# Altium footprint library FanARGB_Parts.PcbLib: 21 footprints (part 1 of 2)
Each footprint in its own frame and in the unit in brackets; x right, y up, seen from the top. Pads: shape width x height; smd on the part's side, far side on the other; paste and mask are expansions set on the pad; w line width, h text height; cw(c..) or ccw(c..) is an arc to the next point about the centre after c.
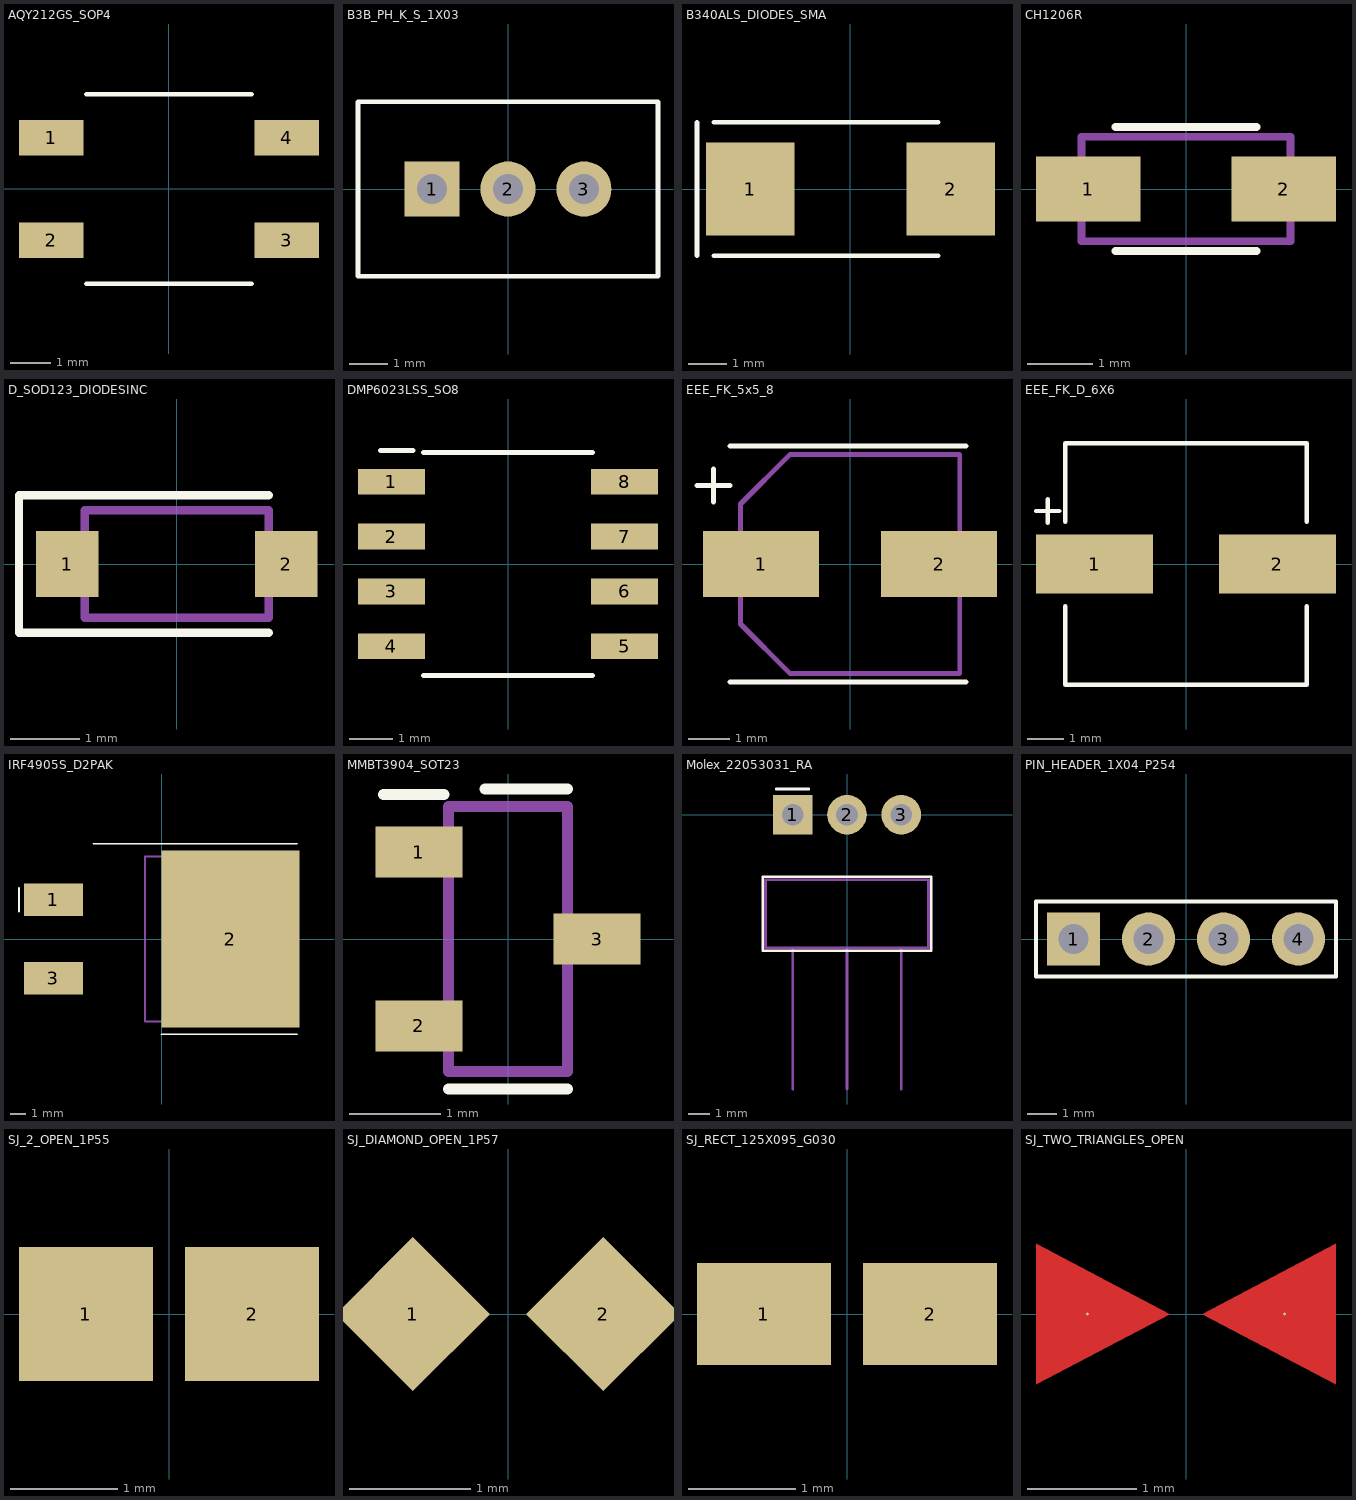
[diagram p0: the footprints below, top view; thin cyan lines are the x and y axes]

## AQY212GS_SOP4 [mm] "Panasonic AQY212GS, four leads"
pads (4):
  rect 1.6x0.88 smd: 1(-2.92,1.27) 2(-2.92,-1.27) 3(2.92,-1.27) 4(2.92,1.27)
Top Overlay:
  lines w0.12: -2.05,-2.35 2.05,-2.35 ; -2.05,2.35 2.05,2.35
3D body "AQY212GS.step": height 2.19, standoff 0.02, extent -3.05,-2.15 3.05,2.15

## B3B_PH_K_S_1X03 [mm] "JST PH 2 mm vertical, B3B-PH-K-S"
pads (3):
  rect 1.45x1.45 hole 0.8: 1(-2,0)
  round 1.45 hole 0.8: 2(0,0) 3(2,0)
Top Overlay:
  lines w0.12: -3.95,-2.3 3.95,-2.3 3.95,2.3 -3.95,2.3 -3.95,-2.3
3D body "JST_PH_3.step": height 6, standoff -2.95, extent -3.95,-2.3 3.95,2.2

## B340ALS_DIODES_SMA [mm] "Diodes Inc B340A-LS 40V 3A SMA Schottky, K1 A2"
pads (2):
  rect 2.3x2.4 smd: 1(-2.6,0) 2(2.6,0)
Top Overlay:
  lines w0.12: -3.98,-1.73 -3.98,1.73 ; -3.55,-1.73 2.28,-1.73 ; -3.55,1.73 2.28,1.73
3D body "D_SMA.step": height 2.22, standoff 0, extent -2.5,-1.35 2.5,1.35

## CH1206R [mm] "1206 resistor, existing NotOnlyFans CH1206R land"
height 0.6
pads (2):
  rect 1.6x1 smd: 1(-1.5,0) 2(1.5,0)
Top Overlay:
  lines w0.12: -1.08,-0.95 1.08,-0.95 ; -1.08,0.95 1.08,0.95
Mechanical 1:
  lines w0.12: -1.6,-0.8 1.6,-0.8 1.6,0.8 -1.6,0.8 -1.6,-0.8
3D body "R1206.step": height 0.55, standoff 0, extent -1.6,-0.8 1.6,0.8

## D_SOD123_DIODESINC [mm] "Diodes Incorporated SOD-123; cathode pad 1"
height 1.35
pads (2):
  rect 0.9x0.95 smd: 1(-1.575,0) 2(1.575,0)
Top Overlay:
  lines w0.12: 1.325,-0.99 -2.27,-0.99 -2.27,0.99 1.325,0.99
Mechanical 1:
  lines w0.12: -1.325,-0.775 -1.325,0.775 1.325,0.775 1.325,-0.775 -1.325,-0.775
3D body "SOD123.step": height 1.25, standoff 0, extent -1.9,-0.8 1.9,0.8

## DMP6023LSS_SO8 [mm] "DMP6023LSS-13 P-MOS -60V, S1-3 G4 D5-8, SO-8"
pads (8):
  rect 1.55x0.6 smd: 1(-2.7,1.905) 2(-2.7,0.635) 3(-2.7,-0.635) 4(-2.7,-1.905) 5(2.7,-1.905) 6(2.7,-0.635) 7(2.7,0.635) 8(2.7,1.905)
Top Overlay:
  lines w0.12: -2.95,2.63 -2.2,2.63 ; -1.95,-2.58 1.95,-2.58 ; -1.95,2.58 1.95,2.58
3D body "SO8.step": height 1.75, standoff 0, extent -3,-2.45 3,2.45

## EEE_FK_5x5_8 [mm] "Panasonic EEE-FK size C, dia. 5 x 5.8 mm; positive pad 1"
height 5.8
pads (2):
  rect 2.8x1.6 smd: 1(-2.15,0) 2(2.15,0)
Top Overlay:
  lines w0.12: -3.7,1.9 -2.9,1.9 ; -3.3,1.5 -3.3,2.3 ; -2.9,-2.85 2.8,-2.85 ; -2.9,2.85 2.8,2.85
Mechanical 1:
  lines w0.12: -2.65,-1.45 -2.65,1.45 -1.45,2.65 2.65,2.65 2.65,-2.65 -1.45,-2.65 -2.65,-1.45
3D body "FK5.step": height 5.8, standoff 0, extent -3.25,-2.65 3.25,2.65

## EEE_FK_D_6X6 [mm] "Panasonic EEE-FK1V470P case D / 6.3 mm, 47uF / 35V"
pads (2):
  rect 3.2x1.6 smd: 1(-2.5,0) 2(2.5,0)
Top Overlay:
  lines w0.12: -4.1,1.45 -3.46,1.45 ; -3.78,1.13 -3.78,1.77 ; -3.3,-1.15 -3.3,-3.3 3.3,-3.3 3.3,-1.15 ; -3.3,1.15 -3.3,3.3 3.3,3.3 3.3,1.15
3D body "full_cap.step": height 5.8, standoff 0, extent -4.05,-3.3 4.05,3.3

## IRF4905S_D2PAK [mm] "Infineon IRF4905S D2PAK; gate 1, drain tab 2, source 3"
height 4.83
pads (3):
  rect 3.81x2.08 smd: 1(-6.985,2.54) 3(-6.985,-2.54)
  rect 8.89x11.43 smd paste-0.65: 2(4.445,0)
Top Overlay:
  lines w0.12: -9.21,1.78 -9.21,3.3 ; -4.4,6.15 8.75,6.15 ; 0,-6.15 8.75,-6.15
Mechanical 1:
  lines w0.12: -1.08,-5.335 -1.08,5.335 8.57,5.335 8.57,-5.335 -1.08,-5.335
3D body "D2PAK.step": height 4.42, standoff 0, extent -7.5,-5 7.5,5

## MMBT3904_SOT23 [mm] "onsemi SOT-23 case 318; base 1, emitter 2, collector 3"
height 1.11
pads (3):
  rect 0.95x0.56 smd: 1(-0.975,0.95) 2(-0.975,-0.95) 3(0.975,0)
Top Overlay:
  lines w0.12: -1.36,1.58 -0.7,1.58 ; -0.65,-1.64 0.65,-1.64 ; -0.25,1.64 0.65,1.64
Mechanical 1:
  lines w0.12: -0.65,-1.45 -0.65,1.45 0.65,1.45 0.65,-1.45 -0.65,-1.45
3D body "SOT23.step": height 1.2, standoff 0, extent -1.25,-1.5 1.25,1.5

## Molex_22053031_RA [mm] "Molex 22-05-3031 KK254 Series 7478, 3 circuit right-angle THT"
height 6.35
pads (3):
  rect 1.85x1.85 hole 1.016: 1(-2.54,0)
  round 1.85 hole 1.016: 2(0,0) 3(2.54,0)
Top Overlay:
  lines w0.12: -3.3,1.2 -1.78,1.2 ; -3.95,-6.37 -3.95,-2.91 3.95,-2.91 3.95,-6.37 -3.95,-6.37
Mechanical 1:
  lines w0.12: -2.54,-12.83 -2.54,-6.23 ; 0,-12.83 0,-6.23 ; 2.54,-12.83 2.54,-6.23 ; -3.81,-6.23 -3.81,-3.05 3.81,-3.05 3.81,-6.23 -3.81,-6.23
3D body "Molex_22053031.step": height 6.35, standoff -3.58, extent -3.81,-12.83 3.81,0.32

## PIN_HEADER_1X04_P254 [mm] "Samtec TSW-104-07-T-S, 1x4 vertical header"
pads (4):
  rect 1.8x1.8 hole 1.016: 1(-3.81,0)
  round 1.8 hole 1.016: 2(-1.27,0) 3(1.27,0) 4(3.81,0)
Top Overlay:
  lines w0.12: -5.08,-1.27 5.08,-1.27 5.08,1.27 -5.08,1.27 -5.08,-1.27
3D body "PinHeader_1x04.step": height 8.26, standoff -3, extent -5.08,-1.27 5.08,1.27

## SJ_2_OPEN_1P55 [mm] "Normally open solder bridge, 0.30 mm copper gap, no paste"
pads (2):
  rect 1.25x1.25 smd: 1(-0.775,0) 2(0.775,0)

## SJ_DIAMOND_OPEN_1P57 [mm] "Normally open solder bridge, 0.297 mm tip gap, no paste on PCB"
pads (2):
  rect 0.9x0.9 smd rot 45 paste-1.25 mask+0.055: 1(-0.785,0) 2(0.785,0)

## SJ_RECT_125X095_G030 [mm] "Normally open solder bridge, 0.30 mm copper gap, no paste"
pads (2):
  rect 1.25x0.95 smd paste-1.25 mask+0.055: 1(-0.775,0) 2(0.775,0)

## SJ_TWO_TRIANGLES_OPEN [mil] "Two opposed triangular copper pads. Normally open."
pads (2):
  round 1 smd paste-49.21 mask+2.17: 1(-35.43,0) 2(35.43,0)
Top Layer:
  region: 53.94,-25.2 53.94,25.2 5.91,0
  region: -53.94,25.2 -53.94,-25.2 -5.91,0